# Altium schematic symbol library 2020-05-10_06-25-11.SchLib: 2 symbols
Pins are listed as number, name and electrical type; pins without a type are passive.

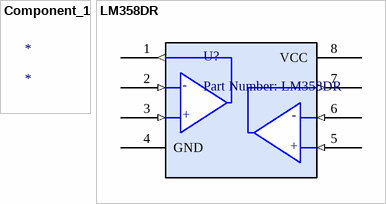
[diagram p0: symbols Component_1 to LM358DR]

## Component_1
designator *

## LM358DR
designator U?, comment Part Number: LM358DR
No Description Available; Manufacturer: Texas Instruments; Built_By: EMA_UL_Team; Vendor: Vendor; Manufacturer_Part_Number: LM358DR; Copyright: Copyright (C) 2018 Accelerated Designs. All rights reserved; RefDes: RefDes; Type: DEV; Value: Value
footprint D8
pins: 1 1OUT (out), 2 1IN- (in), 3 1IN+ (in), 4 GND (power), 5 2IN+ (in), 6 2IN- (in), 7 2OUT (out), 8 VCC (power)
text: -; +